# Altium footprint library RMCF0805JT33R0.PcbLib: 3 footprints
Each footprint in its own frame and in the unit in brackets; x right, y up, seen from the top. Pads: shape width x height; smd on the part's side, far side on the other; paste and mask are expansions set on the pad; w line width, h text height; cw(c..) or ccw(c..) is an arc to the next point about the centre after c.
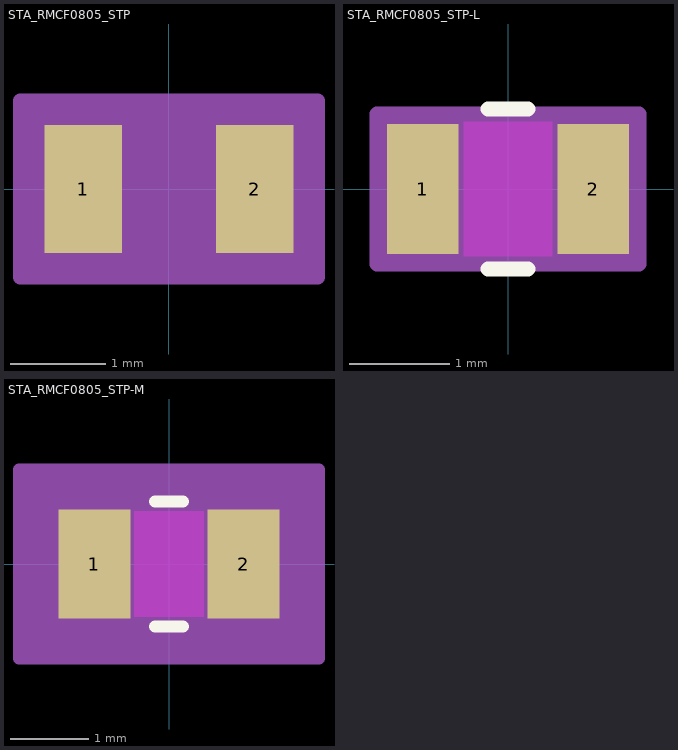
[diagram p0: the footprints below, top view; thin cyan lines are the x and y axes]

## STA_RMCF0805_STP [mil]
pads (2):
  rect 32x53 smd paste+0 mask+0: 1(-35.5,0) 2(35.5,0)
Top Courtyard:
  lines w0.39: -62.01,-37.4 62.01,-37.4 62.01,37.4 -62.01,37.4 -62.01,-37.4
Mechanical 13:
  lines w1: -43.5,-26.5 -43.5,26.5 ; -43.5,-26.5 -19.5,-26.5 -19.5,26.5 -43.5,26.5 ; -43.5,-26.5 43.5,-26.5 ; -43.5,-26.5 -43.5,26.5 ; -43.5,26.5 43.5,26.5 ; 43.5,-26.5 19.5,-26.5 19.5,26.5 43.5,26.5 ; 43.5,-26.5 43.5,26.5 ; 43.5,-26.5 43.5,26.5
Mechanical 15:
  region: 61.5,-36.5 -61.5,-36.5 -61.5,36.5 61.5,36.5
  lines w6: -61.5,-36.5 61.5,-36.5 61.5,36.5 -61.5,36.5 -61.5,-36.5
3D body "STA_RMCF0805_STP.step": height 25.98, standoff 0, extent -43.5,-26.5 43.5,26.5

## STA_RMCF0805_STP-L [mil]
pads (2):
  rect 28x51 smd paste+0 mask+0: 1(-33.5,0) 2(33.5,0)
Top Layer keep-out:
  region: -17.5,-24.5 -17.5,24.5 17.5,24.5 17.5,-24.5
Top Overlay:
  lines w6: -7.85,-31.5 7.85,-31.5 ; -7.85,31.5 7.85,31.5
  text ".Designator" at -137.5,-25 h50
Keep-Out Layer:
  region: -17.5,-26.5 -17.5,26.5 17.5,26.5 17.5,-26.5
Mechanical 13:
  lines w1: -43.5,-26.5 -43.5,26.5 ; -43.5,-26.5 -19.5,-26.5 -19.5,26.5 -43.5,26.5 ; -43.5,-26.5 43.5,-26.5 ; -43.5,-26.5 -43.5,26.5 ; -43.5,26.5 43.5,26.5 ; 43.5,-26.5 19.5,-26.5 19.5,26.5 43.5,26.5 ; 43.5,-26.5 43.5,26.5 ; 43.5,-26.5 43.5,26.5
  text ".Designator" at -137.5,-25 h50
Mechanical 15:
  region: 51.5,-29.5 -51.5,-29.5 -51.5,29.5 51.5,29.5
  lines w6: -51.5,-29.5 -51.5,29.5 51.5,29.5 51.5,-29.5 -51.5,-29.5
3D body "STA_RMCF0805_STP.step": height 25.98, standoff 0, extent -43.5,-26.5 43.5,26.5

## STA_RMCF0805_STP-M [mil]
pads (2):
  rect 36x55 smd paste+0 mask+0: 1(-37.5,0) 2(37.5,0)
Top Layer keep-out:
  region: -17.5,-24.5 -17.5,24.5 17.5,24.5 17.5,-24.5
Top Overlay:
  lines w6: -7.03,-31.5 7.03,-31.5 ; -7.03,31.5 7.03,31.5
  text ".Designator" at -137.5,-25 h50
Keep-Out Layer:
  region: -17.5,-26.5 -17.5,26.5 17.5,26.5 17.5,-26.5
Mechanical 13:
  lines w1: -43.5,-26.5 -43.5,26.5 ; -43.5,-26.5 -19.5,-26.5 -19.5,26.5 -43.5,26.5 ; -43.5,-26.5 43.5,-26.5 ; -43.5,-26.5 -43.5,26.5 ; -43.5,26.5 43.5,26.5 ; 43.5,-26.5 19.5,-26.5 19.5,26.5 43.5,26.5 ; 43.5,-26.5 43.5,26.5 ; 43.5,-26.5 43.5,26.5
  text ".Designator" at -137.5,-25 h50
Mechanical 15:
  region: 75.5,-47.5 -75.5,-47.5 -75.5,47.5 75.5,47.5
  lines w6: -75.5,-47.5 -75.5,47.5 75.5,47.5 75.5,-47.5 -75.5,-47.5
3D body "STA_RMCF0805_STP.step": height 25.98, standoff 0, extent -43.5,-26.5 43.5,26.5